# Altium schematic symbol library Oscilator.SchLib: 3 symbols
Pins are listed as number, name and electrical type; pins without a type are passive.

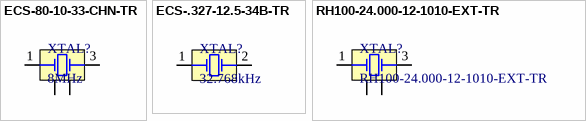
[diagram p0: symbols ECS-80-10-33-CHN-TR to RH100-24.000-12-1010-EXT-TR]

## ECS-80-10-33-CHN-TR
designator XTAL?, comment 8MHz
Crystal 8MHz ±10ppm (Tol) ±25ppm (Stability) 10pF FUND 400Ohm 4-Pin Mini-CSMD T/R; Manufacturer: ECS International; Manufacturer Part Number: ECS-80-10-33-CHN-TR; ESR (Equivalent Series Resistance): 400R; Purpose Of Usage: BASIC; Value: 8000000; RoHS: YES; Category: OSCILATOR; Stock: 9979; Pricing: 1=0.65, 10=0.562, 50=0.512, 100=0.49, 1000=0.417, 10000=0.372 (USD); Case/Package: 3.2 x 2.5; Frequency: 8MHz; Frequency Tolerance: 10ppm; Height: 0.8mm; Length: 3.2mm; Load Capacitance: 10pF; Max Operating Temperature: 85°C; Min Operating Temperature: -40°C; Mount: SMD; Stock ID: ??; Sub-Category: CRYSTAL; Supplier 1: Digi-Key; Supplier Part Number 1: 50-ECS-80-10-33-CHN-TR-ND; Width: 2.5mm
footprint XTAL-3.2x2.5 (Quartz Crystal, size CFPX-180, body 3.2x2.5mm)
pins: 1 Crystal, 2 GND & Lid, 3 Crystal, 4 GND & Lid

## ECS-.327-12.5-34B-TR
designator XTAL?, comment 32.768kHz
Crystal 0.032768MHz ±20ppm (Tol) 12.5pF Flexural 70000Ohm 2-Pin Ultra Mini-CSMD T/R; Manufacturer: ECS International; Manufacturer Part Number: ECS-.327-12.5-34B-TR; ESR (Equivalent Series Resistance): 70kR; Purpose Of Usage: BASIC; Value: 32768; RoHS: YES; Category: OSCILATOR; Stock: 162384; Pricing: 1=0.42, 10=0.361, 50=0.328, 100=0.314, 1000=0.273, 10000=0.238 (USD); Mounting Technology: Surface Mount; Case/Package: 3.2 x 1.5; Min Operating Temperature: -40°C; Max Operating Temperature: 85°C; Frequency: 32.768kHz; Packaging: Tape and Reel; Package Quantity: 3000; Load Capacitance: 12.5pF; Termination: SMD/SMT; Frequency Tolerance: 20ppm; Series: ECX-31B; Length: 3.2mm; Width: 1.5mm; Height: 0.9mm; RoHS Compliant: Yes; Mount: SMD; Stock ID: ??; Sub-Category: CRYSTAL; Supplier 1: Digi-Key; Supplier Part Number 1: 50-ECS-.327-12.5-34B-TR-ND
footprint WE-XTAL_CFPX-217 (Quartz Crystal, size CFPX-217, body 3.2x1.5mm)
pins: 1 Crystal, 2 Crystal

## RH100-24.000-12-1010-EXT-TR
designator XTAL?
Crystal, 24Mhz, 12Pf, Smd, 3.2Mm X 2.5Mm Rohs Compliant: Yes |Raltron RH100-24.000-12-1010-EXT-TR; Manufacturer: Raltron Electronics; Value: 24000000; Purpose Of Usage: BASIC; Supplier Part Number 1: 2151-RH100-24.000-12-1010-EXT-TRCT-ND; Manufacturer Part Number: RH100-24.000-12-1010-EXT-TR; RoHS: YES; Category: OSCILATOR; Stock: 6000; Case/Package: 3.2 x 2.4; Max Operating Temperature: +85; Min Operating Temperature: -40; Mount: SMD; Stock ID: ??; Sub-Category: CRYSTAL; Supplier 1: Digi-Key
footprint WE-XTAL_CFPX-180 (Quartz Crystal, size CFPX-180, body 3.4x2.7mm)
pins: 1 Crystal, 2 GND & Lid, 3 Crystal, 4 GND & Lid